# Altium footprint library ATK-DNN647_V1.0.PcbLib: 73 footprints (part 3 of 5)
Each footprint in its own frame and in the unit in brackets; x right, y up, seen from the top. Pads: shape width x height; smd on the part's side, far side on the other; paste and mask are expansions set on the pad; w line width, h text height; cw(c..) or ccw(c..) is an arc to the next point about the centre after c.
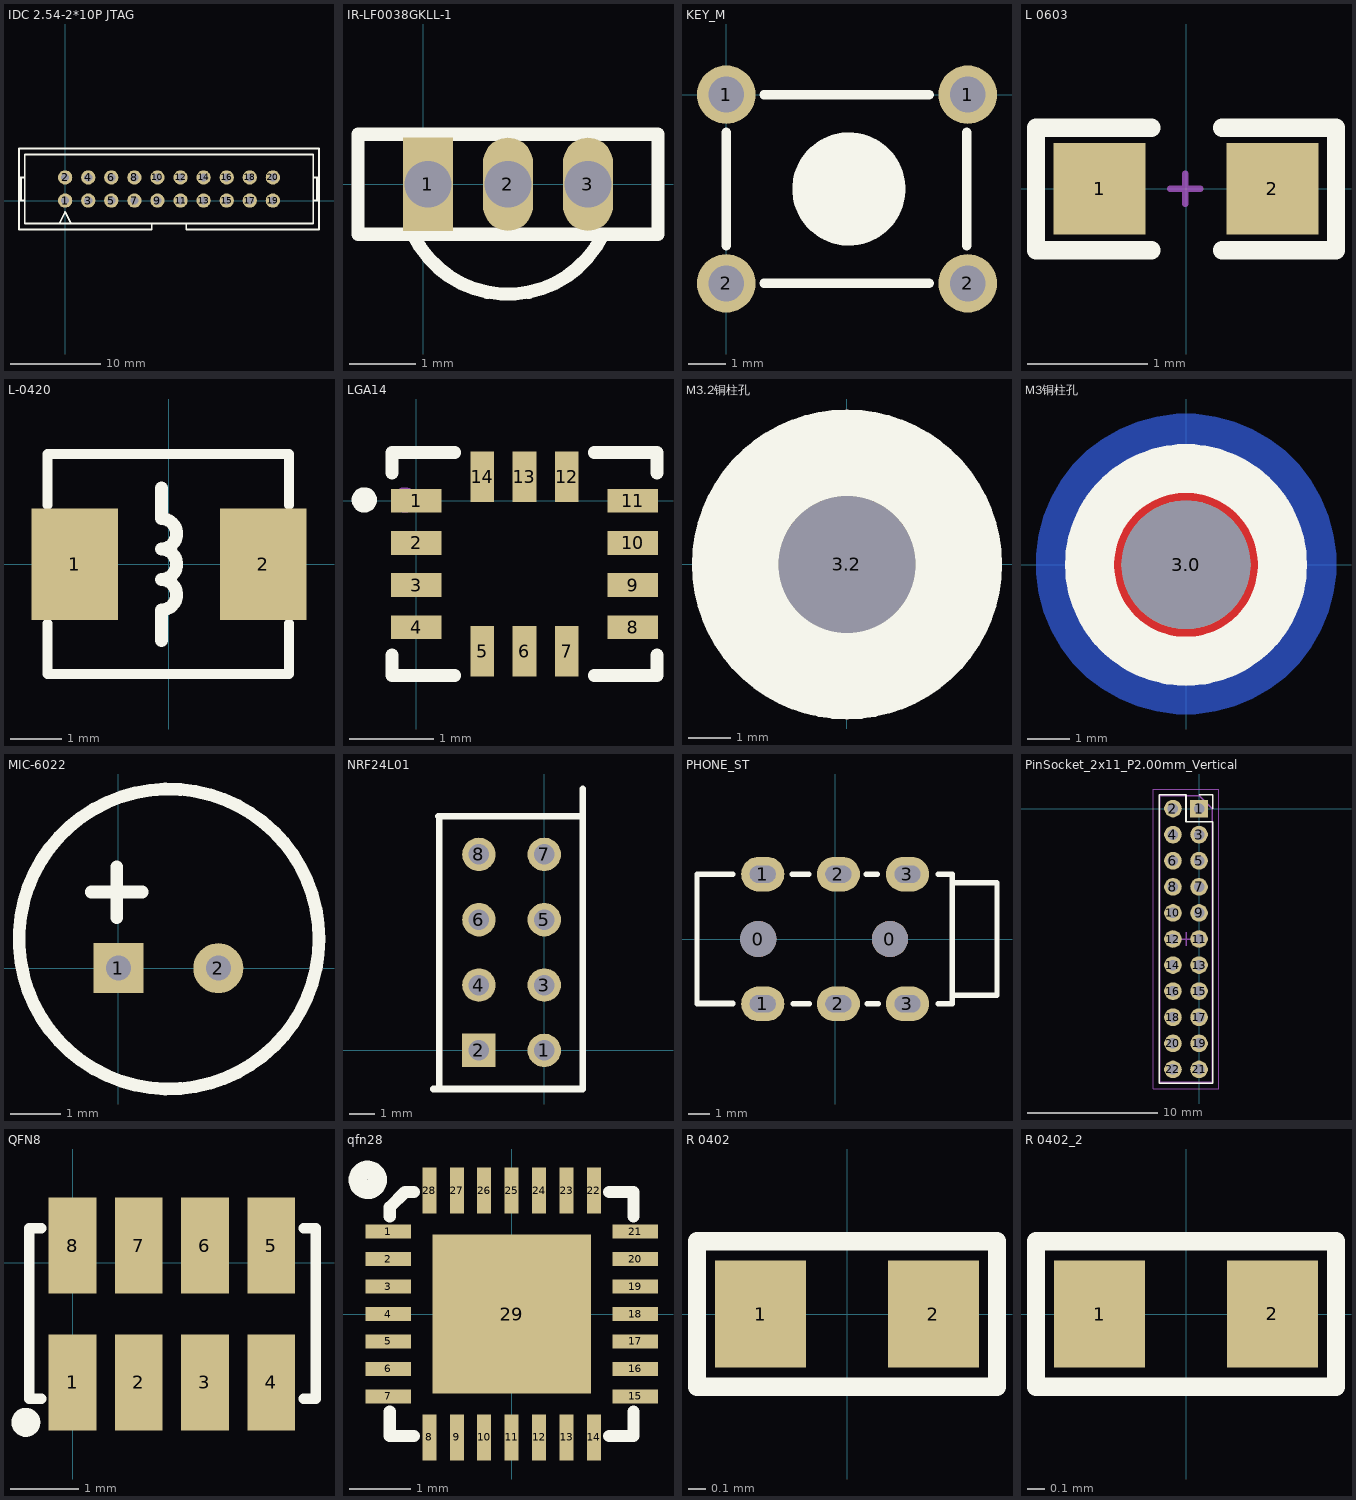
[diagram p2: the footprints below, top view; thin cyan lines are the x and y axes]

## IDC 2.54-2*10P JTAG [mil] "简易牛角座(2*10P,2.54,直插)"
pads (20):
  round 62 hole 35: 1(0,0) 2(0,100) 3(100,0) 4(100,100) 5(200,0) 6(200,100) 7(300,0) 8(300,100) 9(400,0) 10(400,100) 11(500,0) 12(500,100) 13(600,0) 14(600,100) 15(700,0) 16(700,100) 17(800,0) 18(800,100) 19(900,0) 20(900,100)
Top Overlay:
  lines w8: -200,0 -175,0 ; -200,100 -175,100 ; -191.67,0 -191.67,100 ; -25,-100 0,-50 25,-100 ; 110.43,-125 375,-125 375,-100 ; 125,-125 -200,-125 -200,225 1100,225 1100,-125 775,-125 525,-125 525,-100 ; 1075,0 1100,0 ; 1075,100 1100,100 ; 1091.67,0 1091.67,100 ; 375,-100 525,-100 ; 375,-100 -175,-100 -175,200 1075,200 1075,-100 525,-100
3D body "User Library-Samtec-TSS-110-01-G-D.STEP": height 350, standoff -130, extent -123.23,-140.75 1026.77,232.25

## IR-LF0038GKLL-1 [mm] "红外接收管"
pads (3):
  rect 0.75x1.4 hole 0.7: 1(0.07,0)
  oval 0.75x1.4 hole 0.7: 2(1.27,0) 3(2.47,0)
Top Overlay:
  lines w0.2: -0.155,-0.75 ccw(c1.27,-0.072) 2.695,-0.75 ; -0.98,-0.75 -0.98,0.75 3.52,0.75 3.52,-0.75 -0.98,-0.75

## KEY_M [mil]
height 590.55
pads (4):
  round 62 hole 38: 1(0,0) 1(255.91,0) 2(0,-200) 2(255.91,-200)
Top Overlay:
  circle w60: c130,-100 r30
  lines w10: -0.03,-160 -0.03,-40 ; 39.97,-200 215,-200 ; 39.97,0 215,0 ; 255,-160 255,-40

## L 0603 [mil] "贴片电感-0603"
pads (2):
  rect 30x30 smd mask+2: 1(-28.25,0) 2(28.25,0)
Top Overlay:
  lines w6: -11.25,-20.06 -49,-20.06 -49,19.94 -11.25,19.94 ; 11.75,-20.06 49,-20.06 49,19.94 11.75,19.94
Mechanical 15:
  lines w2: -5.25,0 4.75,0 ; -0.25,-5 -0.25,0 -0.25,5
3D body "0603.STEP": height 31.5, standoff -0.11, extent -31.75,-15.75 31.25,15.75

## L-0420 [mm] "贴片电感-0420"
height 8
pads (2):
  rect 1.7x2.2 smd: 1(-1.85,0) 2(1.85,0)
Top Overlay:
  lines w0.2: -2.388,-1.168 -2.388,-2.159 2.362,-2.159 2.362,-1.168 ; -2.388,1.168 -2.388,2.17 2.362,2.17 2.362,1.168
  lines w0.254: -0.15,-1.5 -0.15,-0.9 ccw(c-0.15,-0.6) -0.15,-0.3 ccw(c-0.15,0) -0.15,0.3 ccw(c-0.15,0.6) -0.15,0.9 -0.15,1.5
3D body "User Library-0420CDMCB_DS.STEP": height 1.91, standoff -0.01, extent -2.265,-2.057 2.235,2.042

## LGA14 [mm] "LGA-14_L3.0-W2.5-P0.50-TL"
pads (14):
  rect 0.6x0.28 smd: 1(0,0) 2(0,-0.5) 3(0,-1) 4(0,-1.5) 8(2.575,-1.5) 9(2.575,-1) 10(2.575,-0.5) 11(2.575,0)
  rect 0.28x0.6 smd: 5(0.787,-1.788) 6(1.287,-1.788) 7(1.787,-1.788) 12(1.787,0.288) 13(1.287,0.288) 14(0.787,0.288)
Top Overlay:
  circle w0.15: c-0.618,0.012 r0.075
  lines w0.152: -0.289,0.33 -0.289,0.576 0.457,0.576 ; -0.289,-1.831 -0.289,-2.076 0.457,-2.076 ; 2.118,-2.076 2.863,-2.076 2.863,-1.831 ; 2.118,0.576 2.863,0.576 2.863,0.33
Mechanical 6:
  circle w0.15: c-0.135,0.012 r0.075

## M3.2铜柱孔 [mm] "孔内壁无电镀，带白色丝印增加绝缘"
height 10
pads (1):
  round 3.2 hole 3.2 unplated: 3.2(0,0)
Top Layer:
  pour cut-out: -3.5,0 -3.5,-0.229 -3.44,-0.684 -3.321,-1.127 -3.146,-1.551 -2.916,-1.949 -2.637,-2.313 -2.313,-2.637 -1.949,-2.916 -1.551,-3.146 -1.127,-3.321 -0.684,-3.44 -0.229,-3.5 0,-3.5 0.229,-3.5 0.684,-3.44 1.127,-3.321 1.551,-3.146 1.949,-2.916 2.313,-2.637 2.637,-2.313 2.916,-1.949 3.146,-1.551 3.321,-1.127 3.44,-0.684 3.5,-0.229 3.5,0 3.5,0.229 3.44,0.684 3.321,1.127 3.146,1.551 2.916,1.949 2.637,2.313 2.313,2.637 1.949,2.916 1.551,3.146 1.127,3.321 0.684,3.44 0.229,3.5 0,3.5 -0.229,3.5 -0.684,3.44 -1.127,3.321 -1.551,3.146 -1.949,2.916 -2.313,2.637 -2.637,2.313 -2.916,1.949 -3.146,1.551 -3.321,1.127 -3.44,0.684 -3.5,0.229
Bottom Layer:
  pour cut-out: -3.5,0.02 -3.5,-0.21 -3.44,-0.664 -3.321,-1.108 -3.146,-1.532 -2.916,-1.929 -2.637,-2.293 -2.313,-2.617 -1.949,-2.897 -1.551,-3.126 -1.127,-3.302 -0.684,-3.42 -0.229,-3.48 0,-3.48 0.229,-3.48 0.684,-3.42 1.127,-3.302 1.551,-3.126 1.949,-2.897 2.313,-2.617 2.637,-2.293 2.916,-1.929 3.146,-1.532 3.321,-1.108 3.44,-0.664 3.5,-0.21 3.5,0.02 3.5,0.249 3.44,0.704 3.321,1.147 3.146,1.571 2.916,1.968 2.637,2.332 2.313,2.657 1.949,2.936 1.551,3.166 1.127,3.341 0.684,3.46 0.229,3.52 0,3.52 -0.229,3.52 -0.684,3.46 -1.127,3.341 -1.551,3.166 -1.949,2.936 -2.313,2.657 -2.637,2.332 -2.916,1.968 -3.146,1.571 -3.321,1.147 -3.44,0.704 -3.5,0.249
Top Overlay:
  circle w2.032: c0,0 r2.6
  circle w0.254: c0,0 r3.5
Bottom Overlay:
  circle w1.143: c0,0 r2.25

## M3铜柱孔 [mm] "孔内壁无电镀，带白色丝印增加绝缘"
pads (1):
  round 3 hole 3 unplated: 3.0(0,0)
Top Layer:
  pour cut-out: -2.794,0 -2.794,-0.183 -2.746,-0.546 -2.651,-0.9 -2.511,-1.238 -2.328,-1.556 -2.105,-1.846 -1.846,-2.105 -1.556,-2.328 -1.238,-2.511 -0.9,-2.651 -0.546,-2.746 -0.183,-2.794 0,-2.794 0.183,-2.794 0.546,-2.746 0.9,-2.651 1.238,-2.511 1.556,-2.328 1.846,-2.105 2.105,-1.846 2.328,-1.556 2.511,-1.238 2.651,-0.9 2.746,-0.546 2.794,-0.183 2.794,0 2.794,0.183 2.746,0.546 2.651,0.9 2.511,1.238 2.328,1.556 2.105,1.846 1.846,2.105 1.556,2.328 1.238,2.511 0.9,2.651 0.546,2.746 0.183,2.794 0,2.794 -0.183,2.794 -0.546,2.746 -0.9,2.651 -1.238,2.511 -1.556,2.328 -1.846,2.105 -2.105,1.846 -2.328,1.556 -2.511,1.238 -2.651,0.9 -2.746,0.546 -2.794,0.183
Bottom Layer:
  pour cut-out: -3.5,0.02 -3.5,-0.21 -3.44,-0.664 -3.321,-1.108 -3.146,-1.532 -2.916,-1.929 -2.637,-2.293 -2.313,-2.617 -1.949,-2.897 -1.551,-3.126 -1.127,-3.302 -0.684,-3.42 -0.229,-3.48 0,-3.48 0.229,-3.48 0.684,-3.42 1.127,-3.302 1.551,-3.126 1.949,-2.897 2.313,-2.617 2.637,-2.293 2.916,-1.929 3.146,-1.532 3.321,-1.108 3.44,-0.664 3.5,-0.21 3.5,0.02 3.5,0.249 3.44,0.704 3.321,1.147 3.146,1.571 2.916,1.968 2.637,2.332 2.313,2.657 1.949,2.936 1.551,3.166 1.127,3.341 0.684,3.46 0.229,3.52 0,3.52 -0.229,3.52 -0.684,3.46 -1.127,3.341 -1.551,3.166 -1.949,2.936 -2.313,2.657 -2.637,2.332 -2.916,1.968 -3.146,1.571 -3.321,1.147 -3.44,0.704 -3.5,0.249
Top Overlay:
  circle w1.143: c0,0 r2.25
Bottom Overlay:
  circle w2.032: c0,0 r2.6

## MIC-6022 [mm] "6mm*2.2mm"
height 2.2
pads (2):
  rect 1x1 hole 0.5: 1(0,0)
  round 1 hole 0.5: 2(2,0)
Top Overlay:
  circle w0.254: c1.013,0.584 r3
  lines w0.254: -0.54,1.524 0.476,1.524 ; -0.032,1.016 -0.032,2.032

## NRF24L01 [mm]
height 2
pads (8):
  round 1.3 hole 0.8: 1(0,0) 3(0,2.54) 4(-2.54,2.54) 5(0,5.08) 6(-2.54,5.08) 7(0,7.62) 8(-2.54,7.62)
  rect 1.3x1.3 hole 0.8: 2(-2.54,0)
Top Overlay:
  lines w0.254: -4.318,-1.5 1.5,-1.5 1.5,10.16 ; -4.089,-1.5 -4.089,9.068 -4.115,9.093 1.5,9.093

## PHONE_ST [mm] "PHONE_ST"
height 9
pads (8):
  round 1.676 hole 1.676: 0(-3.556,0) 0(2.54,0)
  oval 2x1.6 hole 0.8 slot 1.2 at 0 deg: 1(-3.35,-3) 1(-3.35,3) 2(0.15,-3) 2(0.15,3) 3(3.35,-3) 3(3.35,3)
Top Overlay:
  lines w0.254: -6.393,-2.969 -4.742,-2.969 ; -4.742,-3.007 -6.393,-3.007 -6.393,3 -4.742,3 ; -1.986,3 -1.224,3 ; -1.948,-3.007 -1.186,-3.007 ; 1.443,3 1.951,3 ; 1.481,-3.007 1.989,-3.007 ; 4.783,-3.007 5.33,-3.007 ; 4.783,3 5.418,3 5.418,-3.007 ; 5.418,-2.6 7.493,-2.6 7.493,2.6 5.418,2.6

## PinSocket_2x11_P2.00mm_Vertical [mm]
height 0.75
pads (22):
  rect 1.35x1.35 hole 0.8: 1(0,0)
  round 1.35 hole 0.8: 2(-2,0) 3(0,-2) 4(-2,-2) 5(0,-4) 6(-2,-4) 7(0,-6) 8(-2,-6) 9(0,-8) 10(-2,-8) 11(0,-10) 12(-2,-10) 13(0,-12) 14(-2,-12) 15(0,-14) 16(-2,-14) 17(0,-16) 18(-2,-16) 19(0,-18) 20(-2,-18) 21(0,-20) 22(-2,-20)
Top Overlay:
  lines w0.12: 0,1.06 1.06,1.06 1.06,0 ; -3.06,-21.06 1.06,-21.06 1.06,-1 -1,-1 -1,1.06 -3.06,1.06 -3.06,-21.06
Mechanical 13:
  lines w0.1: -3,-21 1,-21 1,0 0,1 -3,1 -3,-21
Mechanical 15:
  lines w0.05: -3.5,-21.5 1.5,-21.5 1.5,1.5 -3.5,1.5 -3.5,-21.5
  lines w0.1: -1.5,-10 -0.5,-10 ; -1,-10.5 -1,-9.5
3D body "PinSocket_2x11_P2.00mm_Vertical.step": height 5.6, standoff -2.7, extent -3,-21 1,1

## QFN8 [mm] "QFN,8P,P0.97"
height 1.4
pads (8):
  rect 0.7x1.4 smd: 1(0,-1.753) 2(0.97,-1.753) 3(1.94,-1.753) 4(2.91,-1.753) 5(2.91,0.253) 6(1.94,0.253) 7(0.97,0.253) 8(0,0.253)
Top Overlay:
  circle w0.224: c-0.684,-2.337 r0.1
  lines w0.152: -0.457,-1.992 -0.635,-1.992 -0.635,0.508 -0.457,0.508 ; 3.387,-1.992 3.565,-1.992 3.565,0.508 3.387,0.508

## qfn28 [mm] "QFN, 28-Leads, Body 4.0x4.0mm (max), Pitch 0.45mm, ES8388"
height 0.8
pads (29):
  rect 0.75x0.23 smd: 1(-2.025,1.35) 2(-2.025,0.9) 3(-2.025,0.45) 4(-2.025,0) 5(-2.025,-0.45) 6(-2.025,-0.9) 7(-2.025,-1.35) 15(2.025,-1.35) 16(2.025,-0.9) 17(2.025,-0.45) 18(2.025,0) 19(2.025,0.45) 20(2.025,0.9) 21(2.025,1.35)
  rect 0.23x0.75 smd: 8(-1.35,-2.025) 9(-0.9,-2.025) 10(-0.45,-2.025) 11(0,-2.025) 12(0.45,-2.025) 13(0.9,-2.025) 14(1.35,-2.025) 22(1.35,2.025) 23(0.9,2.025) 24(0.45,2.025) 25(0,2.025) 26(-0.45,2.025) 27(-0.9,2.025) 28(-1.35,2.025)
  rect 2.6x2.6 smd: 29(0,0)
Top Overlay:
  circle w0.31: c-2.36,2.2 r0.16
  lines w0.2: -2,-1.6 -2,-2 -1.6,-2 ; -2,1.6 -2,1.75 -1.75,2 -1.6,2 ; 1.6,-2 2,-2 ; 1.6,2 2,2 2,1.6 ; 2,-2 2,-1.6 2,-2

## R 0402 [mil] "1/16W贴片电阻"
pads (2):
  rect 20x23.62 smd mask+2: 1(-19,0) 2(19,0)
Top Overlay:
  lines w4: 7,-16 33,-16 33,16 7,16 ; 8,16 -33,16 -33,-16 9,-16
3D body "R0402.STEP": height 13.78, standoff 0, extent -19.69,-9.84 19.69,9.84

## R 0402_2 [mil]
pads (2):
  rect 20x23.62 smd mask+2: 1(-19,0) 2(19,0)
Top Overlay:
  lines w4: 7,-16 33,-16 33,16 7,16 ; 8,16 -33,16 -33,-16 9,-16
3D body "R0402.STEP": height 13.78, standoff 0, extent -19.69,-9.84 19.69,9.84